# Altium schematic symbol library 2020-12-05_08-21-53.SchLib: 2 symbols
Pins are listed as number, name and electrical type; pins without a type are passive.

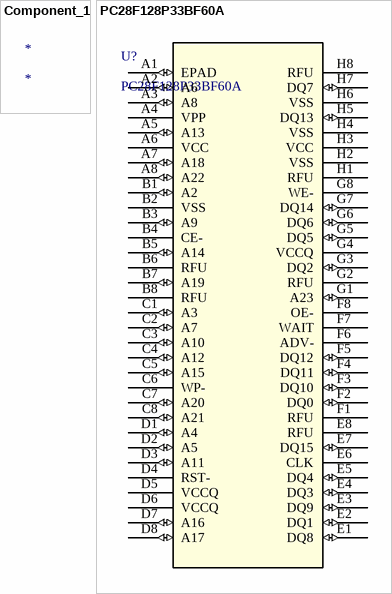
[diagram p0: symbols Component_1 to PC28F128P33BF60A]

## Component_1
designator *

## PC28F128P33BF60A
designator U?
No Description Available; Vendor: Micron; Built_By: EMA_Jessica; SourceLibrary: Micron_2018-04-06; Manufacturer_Part_Number: PC28F128P33BF60A; Copyright: Copyright (C) 2016 Accelerated Designs. All rights reserved; RefDes: RefDes; Type: DEV
footprint BGA64_8X10_MRN
pins: A1 EPAD (io), A2 A6 (io), A3 A8 (io), A4 VPP (power), A5 A13 (io), A6 VCC (power), A7 A18 (io), A8 A22 (io), B1 A2 (io), B2 VSS, B3 A9 (io), B4 CE-, B5 A14 (io), B6 RFU, B7 A19 (io), B8 RFU, C1 A3 (io), C2 A7 (io), C3 A10 (io), C4 A12 (io), C5 A15 (io), C6 WP-, C7 A20 (io), C8 A21 (io), D1 A4 (io), D2 A5 (io), D3 A11 (io), D4 RST-, D5 VCCQ (power), D6 VCCQ (power), D7 A16 (io), D8 A17 (io), E1 DQ8 (io), E2 DQ1 (io), E3 DQ9 (io), E4 DQ3 (io), E5 DQ4 (io), E6 CLK, E7 DQ15 (io), E8 RFU, F1 RFU, F2 DQ0 (io), F3 DQ10 (io), F4 DQ11 (io), F5 DQ12 (io), F6 ADV-, F7 WAIT, F8 OE-, G1 A23 (io), G2 RFU, G3 DQ2 (io), G4 VCCQ (power), G5 DQ5 (io), G6 DQ6 (io), G7 DQ14 (io), G8 WE-, H1 RFU, H2 VSS, H3 VCC (power), H4 VSS, H5 DQ13 (io), H6 VSS, H7 DQ7 (io), H8 RFU